# Altium footprint library data_logger_PcbLib1.PcbLib: 19 footprints (part 1 of 2)
Each footprint in its own frame and in the unit in brackets; x right, y up, seen from the top. Pads: shape width x height; smd on the part's side, far side on the other; paste and mask are expansions set on the pad; w line width, h text height; cw(c..) or ccw(c..) is an arc to the next point about the centre after c.
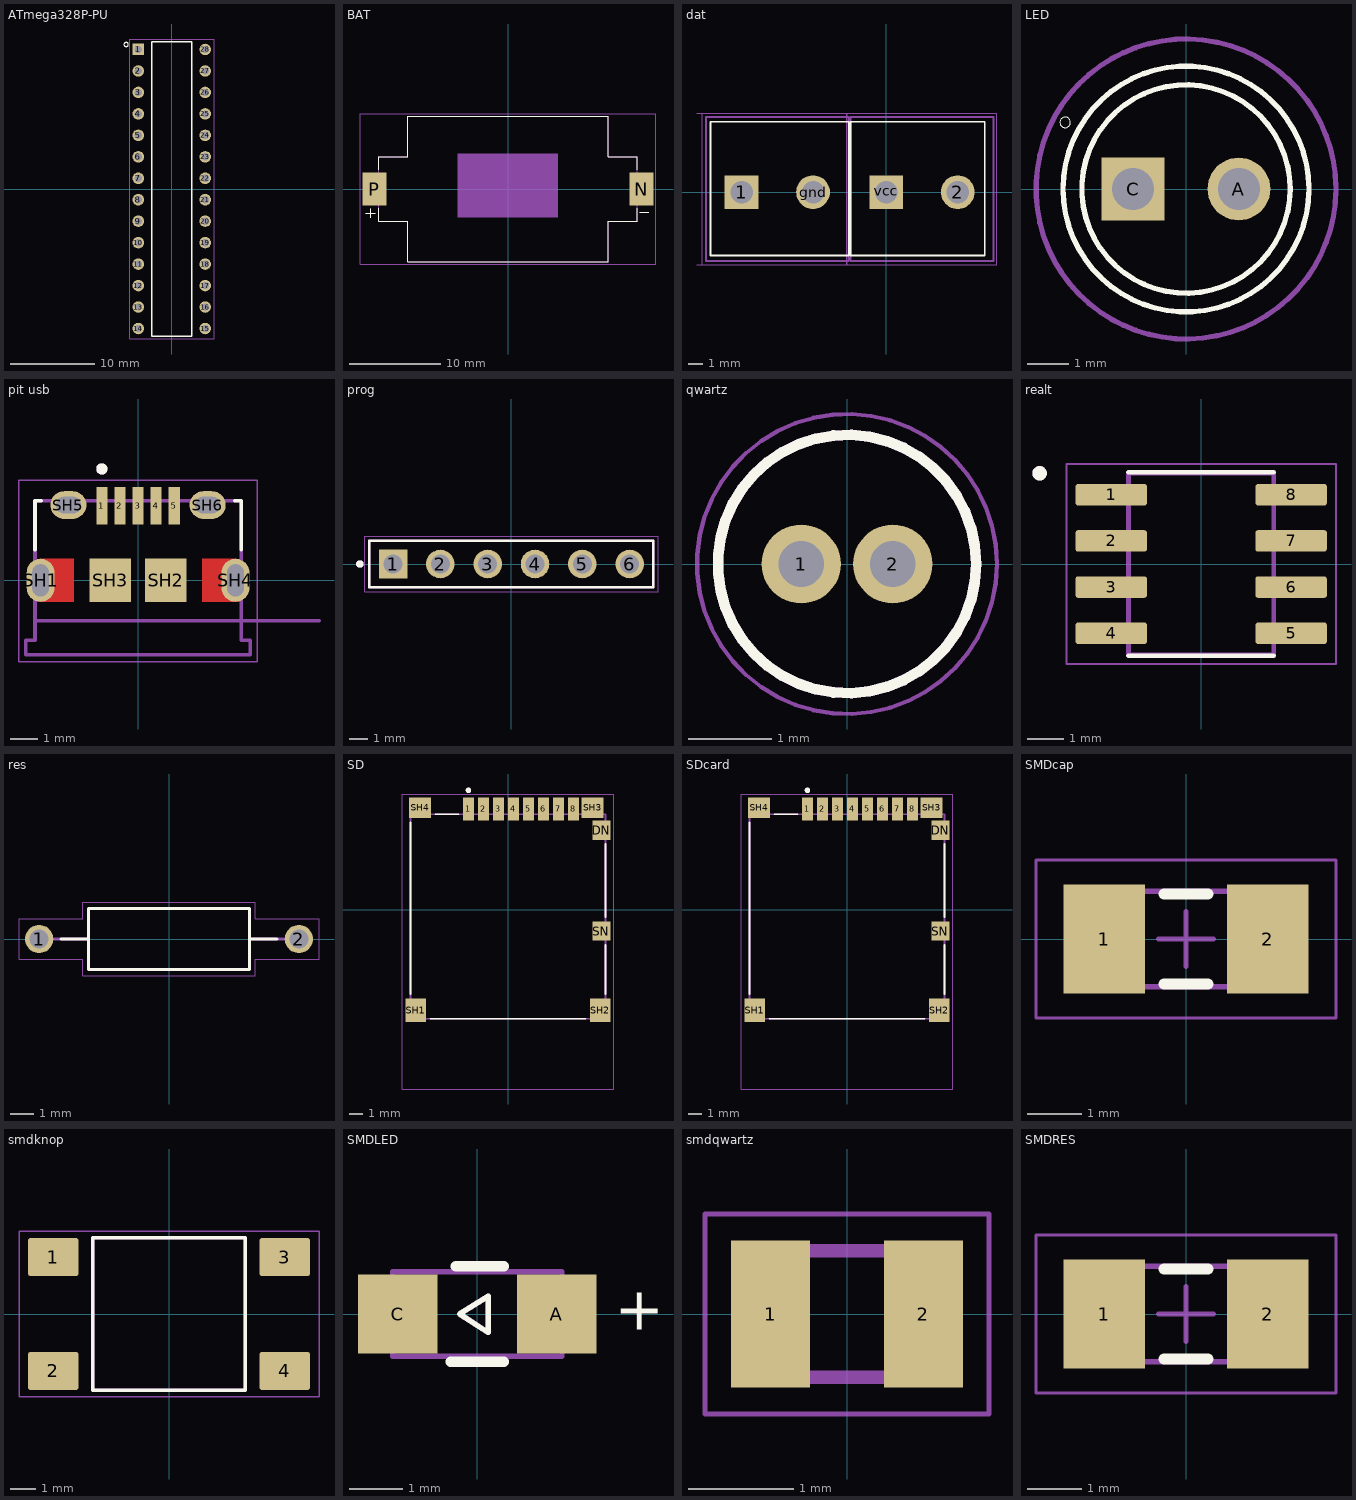
[diagram p0: the footprints below, top view; thin cyan lines are the x and y axes]

## ATmega328P-PU [mm]
pads (28):
  rect 1.358x1.358 hole 0.85: 1(-3.96,16.51)
  round 1.358 hole 0.85: 2(-3.96,13.97) 3(-3.96,11.43) 4(-3.96,8.89) 5(-3.96,6.35) 6(-3.96,3.81) 7(-3.96,1.27) 8(-3.96,-1.27) 9(-3.96,-3.81) 10(-3.96,-6.35) 11(-3.96,-8.89) 12(-3.96,-11.43) 13(-3.96,-13.97) 14(-3.96,-16.51) 15(3.96,-16.51) 16(3.96,-13.97) 17(3.96,-11.43) 18(3.96,-8.89) 19(3.96,-6.35) 20(3.96,-3.81) 21(3.96,-1.27) 22(3.96,1.27) 23(3.96,3.81) 24(3.96,6.35) 25(3.96,8.89) 26(3.96,11.43) 27(3.96,13.97) 28(3.96,16.51)
Top Overlay:
  circle w0: c-5.4,17.1 r0.254
  lines w0.152: -2.38,-17.4 -2.38,17.4 2.38,17.4 2.38,-17.4 -2.38,-17.4
Mechanical 15:
  lines w0.05: -5,-17.75 5,-17.75 5,17.75 -5,17.75 -5,-17.75
3D body "ATMEGA328P-PU--3DModel-STEP-56544.STEP": height 4.57, standoff -3.43, extent -3.95,-17.462 3.95,17.209

## BAT [mm]
height 5.51
pads (2):
  rect 2.59x3.61 smd: N(14.655,0) P(-14.655,0)
Top Overlay:
  lines w0.127: -15.587,-2.667 -14.587,-2.667 ; -15.087,-3.167 -15.087,-2.167 ; -14.2,-2.125 -14.2,-3.531 -11,-3.531 -11,-8 11,-8 11,-3.531 14.2,-3.531 14.2,-2.125 ; -14.2,2.125 -14.2,3.531 -11,3.531 -11,8 11,8 11,3.531 14.2,3.531 14.2,2.125 ; 14.46,-2.54 15.46,-2.54
Mechanical 13:
  region: 5.461,-3.124 -5.539,-3.124 -5.539,3.886 5.461,3.886
  lines w0.127: -15.587,-2.667 -14.587,-2.667 ; -15.087,-3.167 -15.087,-2.167 ; 14.46,-2.54 15.46,-2.54 ; -14.2,-3.531 -11,-3.531 -11,-8 11,-8 11,-3.531 14.2,-3.531 14.2,3.531 11,3.531 11,8 -11,8 -11,3.531 -14.2,3.531 -14.2,-3.531
Mechanical 15:
  lines w0.05: -16.2,-8.25 16.2,-8.25 16.2,8.25 -16.2,8.25 -16.2,-8.25
3D body "step_temp.STEP": height 5.58, standoff -0.11, extent -15.916,-7.943 15.91,8.059

## dat [mm]
pads (4):
  rect 2.4x2.4 / inner round 2.4 / far side rect 2.4x2.4 hole 1.6: 1(-10.287,0) vcc(0,0)
  round 2.4 hole 1.6: 2(5.08,0) gnd(-5.207,0)
Top Overlay:
  lines w0.127: -12.5,-4.5 -12.5,5 -2.667,5 -2.667,-4.5 -12.5,-4.5 ; -2.54,-4.5 7,-4.5 7,5 -2.54,5 -2.54,-4.5
Mechanical 13:
  lines w0.127: -12.827,-4.9 -12.827,5.35 -2.667,5.35 -2.667,-4.9 -12.827,-4.9 ; -2.54,-4.9 7.62,-4.9 7.62,5.35 -2.54,5.35 -2.54,-4.9
Mechanical 15:
  lines w0.05: -13.458,-5.15 -2.798,-5.15 -2.798,5.6 -13.458,5.6 ; -13.077,-5.15 -13.077,5.6 ; -2.79,-5.15 -2.79,5.6 7.87,5.6 7.87,-5.15 -2.79,-5.15
3D body "step_temp.STEP": height 14, standoff -3.7, extent -13.427,-4.998 -2.667,5.252
3D body "step_temp.STEP": height 14, standoff -3.7, extent -3.267,-5.08 7.493,5.17

## LED [mm]
pads (2):
  round 1.508 hole 1: A(1.27,0)
  rect 1.508x1.508 / inner round 1.508 / far side rect 1.508x1.508 hole 1: C(-1.27,0)
Top Overlay:
  circle w0: c-2.9,1.6 r0.127
  circle w0.127: c0,0 r2.5
  circle w0.127: c0,0 r2.95
Mechanical 15:
  circle w0.127: c0,0 r3.6
3D body "step_temp.STEP": height 9.6, standoff -26, extent -2.5,-2.95 2.95,2.95

## pit usb [mm]
height 2.66
pads (11):
  rect 0.4x1.35 smd: 1(-1.3,2.675) 2(-0.65,2.675) 3(0,2.675) 4(0.65,2.675) 5(1.3,2.675)
  oval 1x1.55 hole 0.6 slot 1.15 at 90 deg mask+0: SH1(-3.5,0) SH4(3.5,0)
  rect 1.5x1.55 smd: SH2(1,0) SH3(-1,0)
  oval 1.3x1 hole 0.6 slot 0.9 at 0 deg: SH5(-2.5,2.7) SH6(2.5,2.7)
Top Layer:
  region: 3.471,0.774 3.497,0.772 3.523,0.769 3.549,0.764 3.574,0.758 3.6,0.751 3.624,0.742 3.648,0.732 3.672,0.721 3.695,0.708 3.717,0.694 3.739,0.68 3.76,0.664 3.78,0.647 3.799,0.629 3.817,0.61 3.834,0.59 3.85,0.569 3.864,0.547 3.878,0.525 3.891,0.502 3.902,0.478 3.912,0.454 3.921,0.43 3.928,0.404 3.934,0.379 3.939,0.353 3.942,0.327 3.944,0.301 3.945,0.275 3.945,-0.275 3.944,-0.301 3.942,-0.327 3.939,-0.353 3.934,-0.379 3.928,-0.404 3.921,-0.43 3.912,-0.454 3.902,-0.478 3.891,-0.502 3.878,-0.525 3.864,-0.547 3.85,-0.569 3.834,-0.59 3.817,-0.61 3.799,-0.629 3.78,-0.647 3.76,-0.664 3.739,-0.68 3.717,-0.694 3.695,-0.708 3.672,-0.721 3.648,-0.732 3.624,-0.742 3.6,-0.751 3.574,-0.758 3.549,-0.764 3.523,-0.769 3.497,-0.772 3.471,-0.774 3.445,-0.775 2.3,-0.775 2.3,0.775 3.445,0.775
  region: -2.3,-0.775 -3.445,-0.775 -3.471,-0.774 -3.497,-0.772 -3.523,-0.769 -3.549,-0.764 -3.574,-0.758 -3.6,-0.751 -3.624,-0.742 -3.648,-0.732 -3.672,-0.721 -3.695,-0.708 -3.717,-0.694 -3.739,-0.68 -3.76,-0.664 -3.78,-0.647 -3.799,-0.629 -3.817,-0.61 -3.834,-0.59 -3.85,-0.569 -3.864,-0.547 -3.878,-0.525 -3.891,-0.502 -3.902,-0.478 -3.912,-0.454 -3.921,-0.43 -3.928,-0.404 -3.934,-0.379 -3.939,-0.353 -3.942,-0.327 -3.944,-0.301 -3.945,-0.275 -3.945,0.275 -3.944,0.301 -3.942,0.327 -3.939,0.353 -3.934,0.379 -3.928,0.404 -3.921,0.43 -3.912,0.454 -3.902,0.478 -3.891,0.502 -3.878,0.525 -3.864,0.547 -3.85,0.569 -3.834,0.59 -3.817,0.61 -3.799,0.629 -3.78,0.647 -3.76,0.664 -3.739,0.68 -3.717,0.694 -3.695,0.708 -3.672,0.721 -3.648,0.732 -3.624,0.742 -3.6,0.751 -3.574,0.758 -3.549,0.764 -3.523,0.769 -3.497,0.772 -3.471,0.774 -3.445,0.775 -2.3,0.775
Top Overlay:
  circle w0.2: c-1.3,4 r0.1
  lines w0.127: -3.7,1.1 -3.7,2.85 -3.47,2.85 ; 3.47,2.85 3.7,2.85 3.7,1.1
Top Paste:
  region: 3.471,0.774 3.497,0.772 3.523,0.769 3.549,0.764 3.574,0.758 3.6,0.751 3.624,0.742 3.648,0.732 3.672,0.721 3.695,0.708 3.717,0.694 3.739,0.68 3.76,0.664 3.78,0.647 3.799,0.629 3.817,0.61 3.834,0.59 3.85,0.569 3.864,0.547 3.878,0.525 3.891,0.502 3.902,0.478 3.912,0.454 3.921,0.43 3.928,0.404 3.934,0.379 3.939,0.353 3.942,0.327 3.944,0.301 3.945,0.275 3.945,-0.275 3.944,-0.301 3.942,-0.327 3.939,-0.353 3.934,-0.379 3.928,-0.404 3.921,-0.43 3.912,-0.454 3.902,-0.478 3.891,-0.502 3.878,-0.525 3.864,-0.547 3.85,-0.569 3.834,-0.59 3.817,-0.61 3.799,-0.629 3.78,-0.647 3.76,-0.664 3.739,-0.68 3.717,-0.694 3.695,-0.708 3.672,-0.721 3.648,-0.732 3.624,-0.742 3.6,-0.751 3.574,-0.758 3.549,-0.764 3.523,-0.769 3.497,-0.772 3.471,-0.774 3.445,-0.775 2.3,-0.775 2.3,0.775 3.445,0.775
  region: -2.3,-0.775 -3.445,-0.775 -3.471,-0.774 -3.497,-0.772 -3.523,-0.769 -3.549,-0.764 -3.574,-0.758 -3.6,-0.751 -3.624,-0.742 -3.648,-0.732 -3.672,-0.721 -3.695,-0.708 -3.717,-0.694 -3.739,-0.68 -3.76,-0.664 -3.78,-0.647 -3.799,-0.629 -3.817,-0.61 -3.834,-0.59 -3.85,-0.569 -3.864,-0.547 -3.878,-0.525 -3.891,-0.502 -3.902,-0.478 -3.912,-0.454 -3.921,-0.43 -3.928,-0.404 -3.934,-0.379 -3.939,-0.353 -3.942,-0.327 -3.944,-0.301 -3.945,-0.275 -3.945,0.275 -3.944,0.301 -3.942,0.327 -3.939,0.353 -3.934,0.379 -3.928,0.404 -3.921,0.43 -3.912,0.454 -3.902,0.478 -3.891,0.502 -3.878,0.525 -3.864,0.547 -3.85,0.569 -3.834,0.59 -3.817,0.61 -3.799,0.629 -3.78,0.647 -3.76,0.664 -3.739,0.68 -3.717,0.694 -3.695,0.708 -3.672,0.721 -3.648,0.732 -3.624,0.742 -3.6,0.751 -3.574,0.758 -3.549,0.764 -3.523,0.769 -3.497,0.772 -3.471,0.774 -3.445,0.775 -2.3,0.775
Top Solder:
  region: 3.476,0.874 3.508,0.872 3.539,0.868 3.57,0.862 3.6,0.855 3.63,0.846 3.66,0.835 3.689,0.823 3.717,0.81 3.745,0.795 3.772,0.778 3.798,0.76 3.823,0.741 3.846,0.721 3.869,0.699 3.891,0.676 3.911,0.653 3.93,0.628 3.948,0.602 3.965,0.575 3.98,0.547 3.993,0.519 4.005,0.49 4.016,0.46 4.025,0.43 4.032,0.4 4.038,0.369 4.042,0.338 4.044,0.306 4.045,0.275 4.045,-0.275 4.044,-0.306 4.042,-0.338 4.038,-0.369 4.032,-0.4 4.025,-0.43 4.016,-0.46 4.005,-0.49 3.993,-0.519 3.98,-0.547 3.965,-0.575 3.948,-0.602 3.93,-0.628 3.911,-0.653 3.891,-0.676 3.869,-0.699 3.846,-0.721 3.823,-0.741 3.798,-0.76 3.772,-0.778 3.745,-0.795 3.717,-0.81 3.689,-0.823 3.66,-0.835 3.63,-0.846 3.6,-0.855 3.57,-0.862 3.539,-0.868 3.508,-0.872 3.476,-0.874 3.445,-0.875 2.2,-0.875 2.2,0.875 3.445,0.875
  region: -2.2,-0.875 -3.445,-0.875 -3.476,-0.874 -3.508,-0.872 -3.539,-0.868 -3.57,-0.862 -3.6,-0.855 -3.63,-0.846 -3.66,-0.835 -3.689,-0.823 -3.717,-0.81 -3.745,-0.795 -3.772,-0.778 -3.798,-0.76 -3.823,-0.741 -3.846,-0.721 -3.869,-0.699 -3.891,-0.676 -3.911,-0.653 -3.93,-0.628 -3.948,-0.602 -3.965,-0.575 -3.98,-0.547 -3.993,-0.519 -4.005,-0.49 -4.016,-0.46 -4.025,-0.43 -4.032,-0.4 -4.038,-0.369 -4.042,-0.338 -4.044,-0.306 -4.045,-0.275 -4.045,0.275 -4.044,0.306 -4.042,0.338 -4.038,0.369 -4.032,0.4 -4.025,0.43 -4.016,0.46 -4.005,0.49 -3.993,0.519 -3.98,0.547 -3.965,0.575 -3.948,0.602 -3.93,0.628 -3.911,0.653 -3.891,0.676 -3.869,0.699 -3.846,0.721 -3.823,0.741 -3.798,0.76 -3.772,0.778 -3.745,0.795 -3.717,0.81 -3.689,0.823 -3.66,0.835 -3.63,0.846 -3.6,0.855 -3.57,0.862 -3.539,0.868 -3.508,0.872 -3.476,0.874 -3.445,0.875 -2.2,0.875
Bottom Solder:
  drawing of 2 lines, arcs and shapes, not listed
Mechanical 13:
  circle w0.2: c-1.3,4 r0.1
  lines w0.127: 6.5,-1.45 -3.7,-1.45 ; -3.7,-1.45 -3.7,2.85 3.7,2.85 3.7,-2.15 4.025,-2.15 4.025,-2.68 -4.025,-2.68 -4.025,-2.15 -3.7,-2.15 -3.7,-1.45
  text "PCB EDGE" at 4.25,-1.25 h0.81
Mechanical 15:
  lines w0.05: -4.275,-2.93 4.275,-2.93 4.275,3.6 -4.275,3.6 -4.275,-2.93
3D body "step_temp.STEP": height 2.67, standoff -0.6, extent -4.025,-2.68 4.025,2.85

## prog [mm]
pads (6):
  rect 1.53x1.53 / inner round 1.53 / far side rect 1.53x1.53 hole 1.02 mask+0.102: 1(-6.35,0)
  round 1.53 hole 1.02 mask+0.102: 2(-3.81,0) 3(-1.27,0) 4(1.27,0) 5(3.81,0) 6(6.35,0)
Top Overlay:
  circle w0.2: c-8.13,0 r0.1
  lines w0.127: -7.62,-1.25 -7.62,1.25 7.62,1.25 7.62,-1.25 -7.62,-1.25
Mechanical 13:
  circle w0.2: c-8.13,0 r0.1
  lines w0.127: -7.62,-1.25 -7.62,1.25 7.62,1.25 7.62,-1.25 -7.62,-1.25
Mechanical 15:
  lines w0.05: -7.87,-1.5 -7.87,1.5 7.87,1.5 7.87,-1.5 -7.87,-1.5
3D body "step_temp.STEP": height 8.6, standoff -3, extent -7.62,-1.25 7.62,1.25

## qwartz [mm]
pads (2):
  round 0.95 hole 0.55: 1(-0.55,0) 2(0.55,0)
Top Overlay:
  circle w0.127: c0,0 r1.55
Mechanical 13:
  circle w0.127: c0,0 r1.55
Mechanical 15:
  circle w0.05: c0,0 r1.8
3D body "step_temp.STEP": height 6.2, standoff -10, extent -1.05,-1.05 1.05,1.05

## realt [mm]
pads (8):
  rrect25% 1.97x0.59 smd: 1(-2.475,1.905) 2(-2.475,0.635) 3(-2.475,-0.635) 4(-2.475,-1.905) 5(2.475,-1.905) 6(2.475,-0.635) 7(2.475,0.635) 8(2.475,1.905)
Top Overlay:
  circle w0.2: c-4.445,2.495 r0.1
  lines w0.127: -2,-2.52 2,-2.52 ; -2,2.52 2,2.52
Mechanical 13:
  circle w0.2: c-4.445,2.495 r0.1
  lines w0.127: -2,-2.5 2,-2.5 2,2.5 -2,2.5 -2,-2.5
Mechanical 15:
  lines w0.05: -3.71,-2.75 3.71,-2.75 3.71,2.75 -3.71,2.75 -3.71,-2.75
3D body "step_temp.STEP": height 1.75, standoff 0, extent -3,-2.45 3,2.45

## res [mm]
height 2.6
pads (2):
  round 1.2 hole 0.8: 1(-5.5,0) 2(5.5,0)
Top Overlay:
  lines w0.127: -4.58,0 -3.4,0 ; 4.58,0 3.4,0 ; -3.4,0 -3.4,-1.3 3.4,-1.3 3.4,0 ; -3.4,0 -3.4,1.3 3.4,1.3 3.4,0
Mechanical 13:
  lines w0.127: -4.9,0 -3.4,0 ; 4.9,0 3.4,0 ; -3.4,0 -3.4,-1.3 3.4,-1.3 3.4,0 ; -3.4,0 -3.4,1.3 3.4,1.3 3.4,0
Mechanical 15:
  lines w0.05: -6.35,-0.85 -6.35,0.85 -3.65,0.85 -3.65,1.55 3.65,1.55 3.65,0.85 6.35,0.85 6.35,-0.85 3.65,-0.85 3.65,-1.55 -3.65,-1.55 -3.65,-0.85 -6.35,-0.85
3D body "step_temp.STEP": height 2.4, standoff -26.95, extent -5.775,-1.2 5.775,1.2

## SD [mm]
pads (14):
  rect 0.8x1.68 smd: 1(-2.9,7.385) 2(-1.8,7.385) 3(-0.7,7.385) 4(0.4,7.385) 5(1.5,7.385) 6(2.6,7.385) 7(3.7,7.385) 8(4.8,7.385)
  rect 1.29x1.4 smd: DN(6.855,5.825) SN(6.855,-1.575)
  rect 1.5x1.7 smd: SH1(-6.75,-7.375) SH2(6.75,-7.375)
  rect 1.6x1.5 smd: SH3(6.2,7.475) SH4(-6.45,7.475)
Top Overlay:
  circle w0.2: c-2.9,8.75 r0.1
  lines w0.127: -7.15,-6.205 -7.15,6.41 ; -5.68,-8 5.68,-8 ; -5.33,7 -3.62,7 ; 7.15,-6.21 7.15,-2.59 ; 7.15,-0.56 7.15,4.81
Mechanical 13:
  circle w0.2: c-2.9,8.75 r0.1
  lines w0.127: -7.15,-8 -7.15,7 7.15,7 7.15,-8 -7.15,-8
Mechanical 15:
  lines w0.05: -7.75,-13.15 7.75,-13.15 7.75,8.475 -7.75,8.475 -7.75,-13.15
3D body "5027740891.stp": height 2.13, standoff 0.33, extent -7.166,-8.277 7.134,7.723

## SDcard [mm]
height 1.95
pads (14):
  rect 0.8x1.68 smd: 1(-2.9,7.385) 2(-1.8,7.385) 3(-0.7,7.385) 4(0.4,7.385) 5(1.5,7.385) 6(2.6,7.385) 7(3.7,7.385) 8(4.8,7.385)
  rect 1.29x1.4 smd: DN(6.855,5.825) SN(6.855,-1.575)
  rect 1.5x1.7 smd: SH1(-6.75,-7.375) SH2(6.75,-7.375)
  rect 1.6x1.5 smd: SH3(6.2,7.475) SH4(-6.45,7.475)
Top Overlay:
  circle w0.2: c-2.9,8.75 r0.1
  lines w0.127: -7.15,-6.205 -7.15,6.41 ; -5.68,-8 5.68,-8 ; -5.33,7 -3.62,7 ; 7.15,-6.21 7.15,-2.59 ; 7.15,-0.56 7.15,4.81
Mechanical 13:
  circle w0.2: c-2.9,8.75 r0.1
  lines w0.127: -7.15,-8 7.15,-8 7.15,7 -7.15,7 -7.15,-8
Mechanical 15:
  lines w0.05: -7.75,-13.15 -7.75,8.475 7.75,8.475 7.75,-13.15 -7.75,-13.15
3D body "5027740891.stp": height 2.13, standoff 0.33, extent -7.166,-8.15 7.134,7.85

## SMDcap [mm] "Chip Resistor, 2-Leads, Body 3,20x1,60mm, IPC Low Density"
height 0.8
pads (2):
  rect 1.5x2 smd: 1(-1.5,0) 2(1.5,0)
Top Overlay:
  lines w0.2: -0.4,-0.825 0.4,-0.825 ; -0.4,0.825 0.4,0.825
Top Assembly:
  lines w0.1: -1.7,-0.875 1.7,-0.875 1.7,0.875 -1.7,0.875 -1.7,-0.875
Top Courtyard:
  lines w0.05: -2.75,-1.45 2.75,-1.45 2.75,1.45 -2.75,1.45 -2.75,-1.45
  lines w0.1: -0.5,0 0.5,0 ; 0,-0.5 0,0.5
3D body "SMDRES.step": height 0.8, standoff 0, extent -1.7,-0.875 1.7,0.875

## smdknop [mm]
pads (4):
  rrect15% 2x1.5 smd: 1(-4.55,2.24) 2(-4.55,-2.24) 3(4.55,2.24) 4(4.55,-2.24)
Top Overlay:
  lines w0.127: -3,-3 -3,3 3,3 3,-3 -3,-3
Top Assembly:
  lines w0.127: -3,-3 3,-3 3,3 -3,3 -3,-3
Top Courtyard:
  lines w0.05: -5.9,-3.25 5.9,-3.25 5.9,3.25 -5.9,3.25 -5.9,-3.25
3D body "step_temp.STEP": height 5.07, standoff 0, extent -5,-3 5,3

## SMDLED [mm]
pads (2):
  rect 1.5x1.5 smd: A(1.5,0) C(-1.5,0)
Top Overlay:
  lines w0.1: -0.33,0 0.21,0.34 0.21,-0.35 -0.33,0
  lines w0.2: -0.5,-0.9 0.5,-0.9 ; -0.4,0.9 0.5,0.9
  text "+" at 2.6,-0.3 h0.81
Top Assembly:
  lines w0.1: -1.6,-0.8 1.6,-0.8 1.6,0.8 -1.6,0.8 -1.6,-0.8 ; -0.33,0 0.21,0.34 0.21,-0.35 -0.33,0
  text "+" at 2.6,-0.3 h0.81
3D body "step_temp.STEP": height 0.68, standoff 0, extent -1.6,-0.8 1.6,0.8

## smdqwartz [mm]
height 0.6
pads (2):
  rect 0.75x1.4 smd: 1(-0.725,0) 2(0.725,0)
Mechanical 13:
  lines w0.127: -1,-0.6 -1,0.6 1,0.6 1,-0.6 -1,-0.6
Mechanical 15:
  lines w0.05: -1.35,-0.95 -1.35,0.95 1.35,0.95 1.35,-0.95 -1.35,-0.95
3D body "step_temp.STEP": height 0.61, standoff 0, extent -1.003,-0.597 1.003,0.597

## SMDRES [mm] "Chip Resistor, 2-Leads, Body 3,20x1,60mm, IPC Low Density"
height 0.8
pads (2):
  rect 1.5x2 smd: 1(-1.5,0) 2(1.5,0)
Top Overlay:
  lines w0.2: -0.4,-0.825 0.4,-0.825 ; -0.4,0.825 0.4,0.825
Top Assembly:
  lines w0.1: -1.7,-0.875 -1.7,0.875 1.7,0.875 1.7,-0.875 -1.7,-0.875
Top Courtyard:
  lines w0.05: -2.75,-1.45 -2.75,1.45 2.75,1.45 2.75,-1.45 -2.75,-1.45
  lines w0.1: -0.5,0 0.5,0 ; 0,-0.5 0,0.5
3D body "SMDRES.step": height 0.8, standoff 0, extent -1.7,-0.875 1.7,0.875